# Altium integrated library G5NB-1A-E_DC12.IntLib: 1 symbol
Pins are listed as number, name and electrical type; pins without a type are passive.

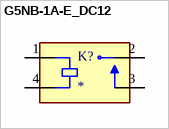
[diagram p0: symbol G5NB-1A-E_DC12]

## G5NB-1A-E_DC12
designator K?
Power PCB Relay, 3A/5A, SPST-NO, 12 VDC, G5NB Series | Omron Electronic Components G5NB-1A-E DC12; MF: Omron Electronics Inc-EMC Div; SnapEDA_Link: https://www.snapeda.com/parts/G5NB-1A-E%20DC12/Omron/view-part/?ref=snap; Package: None; Value: *; MP: G5NB-1A-E DC12; Check_prices: https://www.snapeda.com/parts/G5NB-1A-E%20DC12/Omron/view-part/?ref=eda
footprint RELAY_G5NB-1A-E_DC12
pins: 1 COIL1, 2 COM, 3 NO, 4 COIL2